# Altium footprint library SamacSys.PcbLib: 1008 footprints (part 23 of 63)
Each footprint in its own frame and in the unit in brackets; x right, y up, seen from the top. Pads: shape width x height; smd on the part's side, far side on the other; paste and mask are expansions set on the pad; w line width, h text height; cw(c..) or ccw(c..) is an arc to the next point about the centre after c.
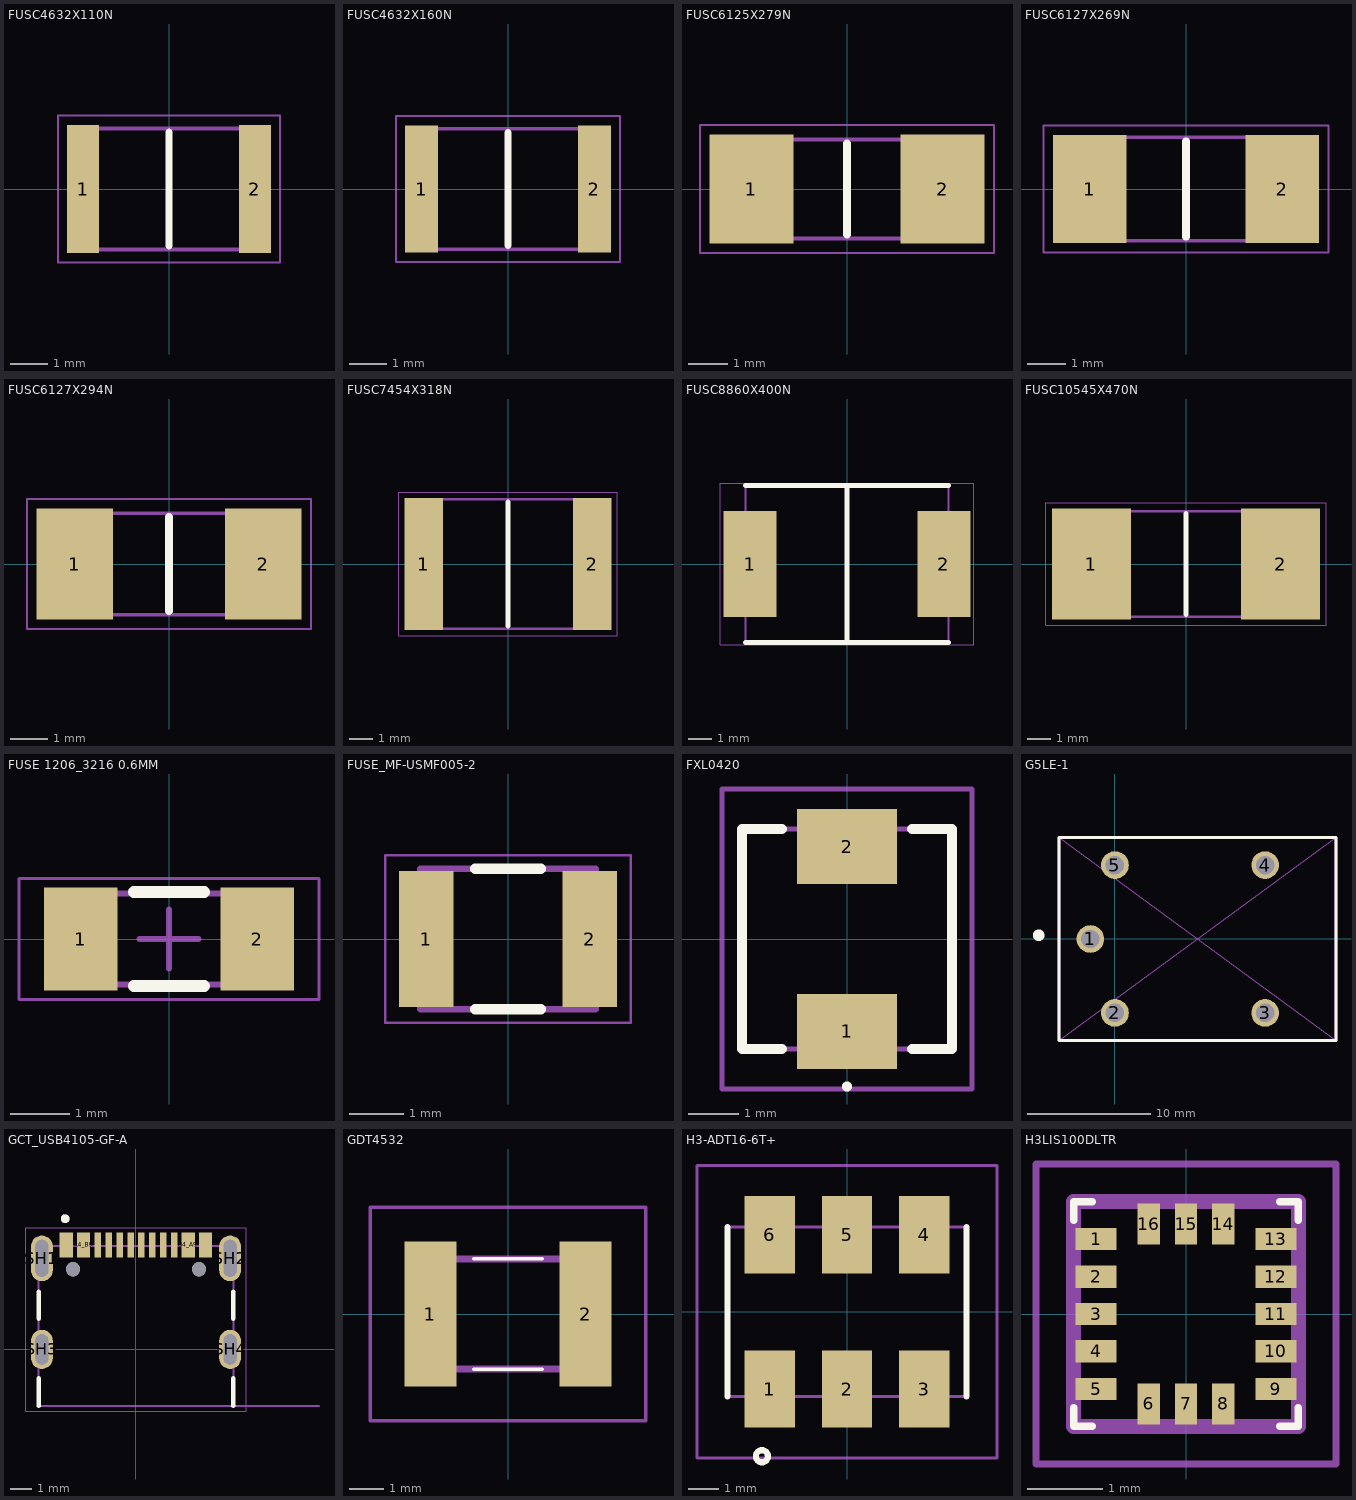
[diagram p22: the footprints below, top view; thin cyan lines are the x and y axes]

## FUSC4632X110N [mm]
pads (2):
  rect 0.85x3.43 smd: 1(-2.3,0) 2(2.3,0)
Top Overlay:
  lines w0.2: 0,-1.52 0,1.52
Assembly:
  lines w0.1: -2.275,-1.62 -2.275,1.62 2.275,1.62 2.275,-1.62 -2.275,-1.62
Countryard:
  lines w0.05: -2.975,-1.965 -2.975,1.965 2.975,1.965 2.975,-1.965 -2.975,-1.965
3D body "MF-MSMF010.stp": height 1.1, standoff 0, extent -2.275,-1.62 2.275,1.62

## FUSC4632X160N [mm]
pads (2):
  rect 0.89x3.43 smd: 1(-2.325,0) 2(2.325,0)
Top Overlay:
  lines w0.2: 0,-1.52 0,1.52
Assembly:
  lines w0.1: -2.3,-1.62 -2.3,1.62 2.3,1.62 2.3,-1.62 -2.3,-1.62
Countryard:
  lines w0.05: -3.02,-1.965 -3.02,1.965 3.02,1.965 3.02,-1.965 -3.02,-1.965
3D body "MF-MSMF150_24X-2.stp": height 1.6, standoff 0, extent -2.3,-1.62 2.3,1.62

## FUSC6125X279N [mm]
pads (2):
  rect 2.15x2.8 smd: 1(-2.455,0) 2(2.455,0)
Top Overlay:
  lines w0.2: 0,-1.17 0,1.17
Assembly:
  lines w0.1: -3.05,-1.27 -3.05,1.27 3.05,1.27 3.05,-1.27 -3.05,-1.27
Countryard:
  lines w0.05: -3.78,-1.65 -3.78,1.65 3.78,1.65 3.78,-1.65 -3.78,-1.65
3D body "0679H2000-05.stp": height 2.79, standoff 0, extent -3.05,-1.27 3.05,1.27

## FUSC6127X269N [mm]
pads (2):
  rect 1.91x2.8 smd: 1(-2.5,0) 2(2.5,0)
Top Overlay:
  lines w0.2: 0,-1.245 0,1.245
Assembly:
  lines w0.1: -3.05,-1.345 -3.05,1.345 3.05,1.345 3.05,-1.345 -3.05,-1.345
Countryard:
  lines w0.05: -3.705,-1.65 -3.705,1.65 3.705,1.65 3.705,-1.65 -3.705,-1.65
3D body "045201.5MRL.stp": height 2.69, standoff 0, extent -3.05,-1.345 3.05,1.345

## FUSC6127X294N [mm]
pads (2):
  rect 2.02x2.95 smd: 1(-2.5,0) 2(2.5,0)
Top Overlay:
  lines w0.2: 0,-1.245 0,1.245
Assembly:
  lines w0.1: -3.05,-1.345 3.05,-1.345 3.05,1.345 -3.05,1.345 -3.05,-1.345
Countryard:
  lines w0.05: -3.76,-1.725 3.76,-1.725 3.76,1.725 -3.76,1.725 -3.76,-1.725
3D body "0448005.MR.stp": height 2.94, standoff 0, extent -3.05,-1.345 3.05,1.345

## FUSC7454X318N [mm]
pads (2):
  rect 1.62x5.55 smd: 1(-3.535,0) 2(3.535,0)
Top Overlay:
  lines w0.2: 0,-2.62 0,2.62
Assembly:
  lines w0.1: -3.678,-2.72 -3.678,2.72 3.678,2.72 3.678,-2.72 -3.678,-2.72
Countryard:
  lines w0.05: -4.595,-3.025 -4.595,3.025 4.595,3.025 4.595,-3.025 -4.595,-3.025
3D body "MF-SM030-2-99.stp": height 3.18, standoff 0, extent -3.678,-2.72 3.678,2.72

## FUSC8860X400N [mm]
pads (2):
  rect 2.3x4.6 smd: 1(-4.2,0) 2(4.2,0)
Top Overlay:
  lines w0.2: -4.4,-3.4 4.4,-3.4 ; -4.4,3.4 4.4,3.4 ; 0,-3.4 0,3.4
Assembly:
  lines w0.1: -4.4,-3.4 -4.4,3.4 4.4,3.4 4.4,-3.4 -4.4,-3.4
Countryard:
  lines w0.05: -5.5,-3.5 -5.5,3.5 5.5,3.5 5.5,-3.5 -5.5,-3.5
3D body "MF-SM185_33-2.stp": height 3.14, standoff 0.14, extent -4.375,-3.355 4.375,3.355

## FUSC10545X470N [mm]
pads (2):
  rect 3.37x4.72 smd: 1(-4.025,0) 2(4.025,0)
Top Overlay:
  lines w0.2: 0,-2.15 0,2.15
Assembly:
  lines w0.1: -5.25,-2.25 5.25,-2.25 5.25,2.25 -5.25,2.25 -5.25,-2.25
Countryard:
  lines w0.05: -5.96,-2.61 5.96,-2.61 5.96,2.61 -5.96,2.61 -5.96,-2.61
3D body "46212000000.stp": height 4.7, standoff 0, extent -5.25,-2.25 5.25,2.25

## FUSE 1206_3216 0.6MM [mm] "Chip Fuse 1.5A AC 63V DC, 2-Leads, Body 3.10x1.55mm, IPC Medium Densitym"
height 0.7
pads (2):
  rect 1.25x1.75 smd: 1(-1.5,0) 2(1.5,0)
Top Overlay:
  lines w0.2: -0.6,-0.8 0.6,-0.8 ; -0.6,0.8 0.6,0.8
Assembly:
  lines w0.1: -1.55,-0.775 -1.55,0.775 1.55,0.775 1.55,-0.775 -1.55,-0.775
Countryard:
  lines w0.05: -2.55,-1.025 -2.55,1.025 2.55,1.025 2.55,-1.025 -2.55,-1.025
  lines w0.1: -0.5,0 0.5,0 ; 0,-0.5 0,0.5
3D body "FUSE 1206_3216 0.6MM.step": height 0.76, standoff 0, extent -1.55,-0.775 1.55,0.775

## FUSE_MF-USMF005-2 [mm]
height 1.1
pads (2):
  rect 1x2.5 smd: 1(-1.5,0) 2(1.5,0)
Top Overlay:
  lines w0.2: -0.6,-1.288 0.6,-1.288 ; -0.6,1.288 0.6,1.288
Assembly:
  lines w0.127: -1.607,-1.288 -1.607,1.288 1.607,1.288 1.607,-1.288 -1.607,-1.288
Countryard:
  lines w0.05: -2.25,-1.538 2.25,-1.538 2.25,1.538 -2.25,1.538 -2.25,-1.538
3D body "FUSE 1206_3216 0.6MM.step": height 0.76, standoff 0, extent -1.55,-0.775 1.55,0.775

## FXL0420 [mm]
height 2
pads (2):
  rect 2x1.5 smd: 1(0,-1.85) 2(0,1.85)
Top Overlay:
  lines w0.1: 0,-3 ccw(c0,-2.95) 0,-2.9 ccw(c0,-2.95) 0,-3
  lines w0.2: -1.3,-2.2 -2.1,-2.2 -2.1,2.2 -1.3,2.2 ; 1.3,-2.2 2.1,-2.2 2.1,2.2 1.3,2.2
Assembly:
  lines w0.1: -2.1,-2.2 -2.1,2.2 2.1,2.2 2.1,-2.2 -2.1,-2.2
Countryard:
  lines w0.1: -2.5,-3 2.5,-3 2.5,3 -2.5,3 -2.5,-3
3D body: height 2, standoff 0, extent -2.1,-2.2 2.1,2.2

## G5LE-1 [mm]
pads (5):
  round 2.25 hole 1.5: 1(-2,0) 2(0,-6) 3(12.2,-6) 4(12.2,6) 5(0,6)
Top Overlay:
  circle w0.5: c-6.193,0.301 r0.219
  lines w0.254: -4.55,-8.25 -4.55,8.25 17.95,8.25 17.95,-8.25 -4.55,-8.25
Mechanical 10:
  lines w0.1: -4.55,-8.25 17.95,8.25 ; -4.55,8.25 17.95,-8.25
Assembly:
  lines w0.254: -4.55,-8.25 17.95,-8.25 17.95,8.25 -4.55,8.25 -4.55,-8.25
3D body "G5LE-14_12DC.stp": height 18.5, standoff -4, extent -4.55,-8.25 17.95,8.25

## GCT_USB4105-GF-A [mm]
height 3.31
pads (18):
  rect 0.6x1.15 smd mask+0.05: A1_B12(-3.2,4.8) A4_B9(-2.4,4.8) B1_A12(3.2,4.8) B4_A9(2.4,4.8)
  rect 0.3x1.15 smd mask+0.05: A5(-1.25,4.8) A6(-0.25,4.8) A7(0.25,4.8) A8(1.25,4.8) B5(1.75,4.8) B6(0.75,4.8) B7(-0.75,4.8) B8(-1.75,4.8)
  oval 1x2.1 hole 0.6 slot 1.7 at 90 deg: SH1(-4.32,4.18) SH2(4.32,4.18)
  oval 1x1.8 hole 0.6 slot 1.4 at 90 deg: SH3(-4.32,0) SH4(4.32,0)
  round 0.65 hole 0.65 unplated: ""(-2.89,3.68) ""(2.89,3.68)
Top Overlay:
  circle w0.2: c-3.25,6 r0.1
  lines w0.2: -4.47,-2.6 -4.47,-1.32 ; -4.47,1.4 -4.47,2.65 ; 4.47,-2.6 4.47,-1.32 ; 4.47,1.4 4.47,2.65
Assembly:
  circle w0.2: c-3.25,6 r0.1
  lines w0.1: 8.4,-2.6 4.47,-2.6 ; 4.47,-2.6 4.47,4.75 -4.47,4.75 -4.47,-2.6 4.47,-2.6
  text "PCB EDGE" at 5.4,-2.5 h0.41
Countryard:
  lines w0.05: -5.07,-2.85 -5.07,5.58 5.07,5.58 5.07,-2.85 -5.07,-2.85
3D body "USB4105-GF-A--3DModel-STEP-510211.STEP": height 3.31, standoff -1.1, extent -4.47,-2.6 4.47,5.11

## GDT4532 [mm]
height 3
pads (2):
  rect 1.5x4.2 smd: 1(-2.25,0) 2(2.25,0)
Top Overlay:
  lines w0.1: -1,-1.6 1,-1.6 ; -1,1.6 1,1.6
Assembly:
  lines w0.2: -2.25,-1.6 -2.25,1.6 2.25,1.6 2.25,-1.6 -2.25,-1.6
Countryard:
  lines w0.1: -4,-3.1 -4,3.1 4,3.1 4,-3.1 -4,-3.1
3D body "4532151LF.step": height 3.2, standoff 0, extent -2.25,-1.55 2.25,1.65

## H3-ADT16-6T+ [mm] "Chengdu / Mini-Circuits reverse"
pads (6):
  rect 1.65x2.54 smd: 1(-2.54,-2.54) 2(0,-2.54) 3(2.54,-2.54) 4(2.54,2.54) 5(0,2.54) 6(-2.54,2.54)
Top Overlay:
  lines w0.2: -3.935,-2.79 -3.935,2.79 ; 3.935,-2.79 3.935,2.79 ; -2.8,-4.95 ccw(c-2.8,-4.75) -2.8,-4.55 ccw(c-2.8,-4.75) -2.8,-4.95
Assembly:
  lines w0.1: -3.935,-2.79 -3.935,2.79 3.935,2.79 3.935,-2.79 -3.935,-2.79
Countryard:
  lines w0.1: -4.935,-4.81 -4.935,4.81 4.935,4.81 4.935,-4.81 -4.935,-4.81
3D body "ADT16-6T+.stp": height 5.33, standoff 0, extent -3.935,-3.645 3.935,3.645

## H3LIS100DLTR [mm]
pads (16):
  rect 0.55x0.3 smd: 1(-1.2,1) 2(-1.2,0.5) 3(-1.2,0) 4(-1.2,-0.5) 5(-1.2,-1) 9(1.2,-1) 10(1.2,-0.5) 11(1.2,0) 12(1.2,0.5) 13(1.2,1)
  rect 0.3x0.55 smd: 6(-0.5,-1.2) 7(0,-1.2) 8(0.5,-1.2) 14(0.5,1.2) 15(0,1.2) 16(-0.5,1.2)
Top Overlay:
  lines w0.1: -1.5,-1.25 -1.5,-1.5 -1.25,-1.5 ; -1.5,1.25 -1.5,1.5 -1.25,1.5 ; 1.25,-1.5 1.5,-1.5 1.5,-1.25 ; 1.25,1.5 1.5,1.5 1.5,1.25
Assembly:
  lines w0.2: -1.5,-1.5 -1.5,1.5 1.5,1.5 1.5,-1.5 -1.5,-1.5
Countryard:
  lines w0.1: -2,-2 -2,2 2,2 2,-2 -2,-2
3D body "LIS3DH.stp": height 1, standoff 0, extent -1.5,-1.5 1.5,1.5